# EAGLE library part U1_DEV (library evfcam_mvp)
BQ25185 charger + 5 V boost breakout, pins through the board
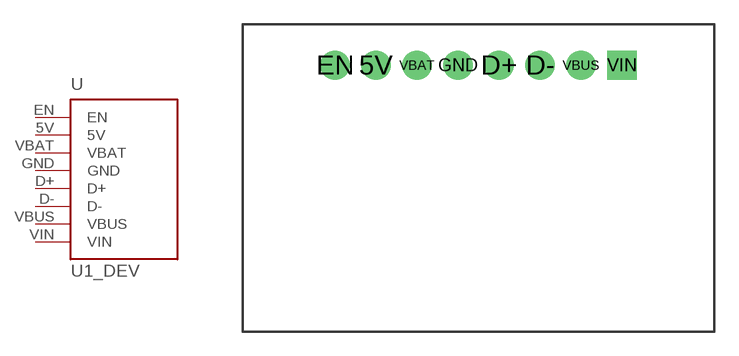
[diagram p2: symbol with the pads of U1_PKG; footprint U1_PKG]

Designator prefix U

## U1_DEV  [U1_PKG]
5V  5V  pas
D+  D+  pas
D-  D-  pas
EN  EN  pas
GND  GND  pas
VBAT  VBAT  pas
VBUS  VBUS  pas
VIN  VIN  pas

## Footprint U1_PKG (pad centres in mm)
BQ25185 charger + 5 V boost breakout, pins through the board
drill 1 pad 1.8 round: 5V -6.35,0; D+ 1.27,0; D- 3.81,0; EN -8.89,0; GND -1.27,0; VBAT -3.81,0; VBUS 6.35,0
drill 1 pad 1.8 square: VIN 8.89,0